# EAGLE library part TRIFILAR_TRANSFORMER (library HansToroid)
Transformer (having 3 windings) on a T50 Toroid
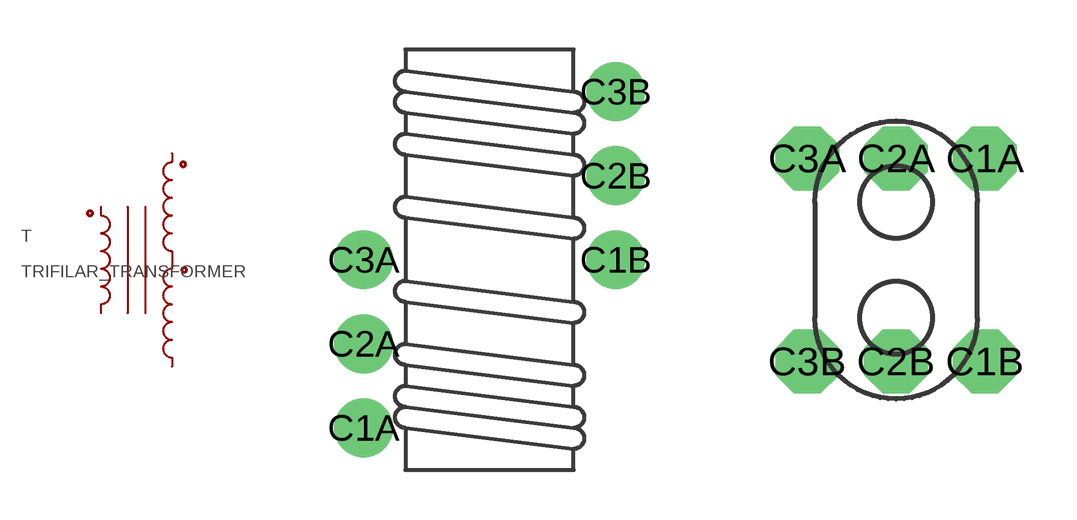
[diagram p3: symbol with the pads of T50_TRIFILAR_TRANSFORMER; footprints T50_TRIFILAR_TRANSFORMER, BN*2402_TRANSFORMER]

Designator prefix T

## TRIFILAR_TRANSFORMERTOROID  [T50_TRIFILAR_TRANSFORMER]
C1A  C1A
C1B  C1B
C2A  C2A
C2B  C2B
C3A  C3A
C3B  C3B

## TRIFILAR_TRANSFORMERBIN*2402  [BN*2402_TRANSFORMER]
Pads as for T50_TRIFILAR_TRANSFORMER

## TRIFILAR_TRANSFORMERT64_FLAT  [T64_TRIFILAR_TRANS_FLAT]
Pads as for T50_TRIFILAR_TRANSFORMER

## Footprint T50_TRIFILAR_TRANSFORMER (pad centres in mm)
Transformer (having 3 windings) on a T50 Toroid
drill 0.6 pad 1.778: C1A -3.81,-5.08; C1B 3.81,0; C2A -3.81,-2.54; C2B 3.81,2.54; C3A -3.81,0; C3B 3.81,5.08

## Footprint BN*2402_TRANSFORMER (pad centres in mm)
Transformer wound on a BN61-2402 Toroid
drill 0.914 pad 1.6 octagon: C1A 2.223,2.54; C1B 2.223,-2.54; C2A 0,2.54; C2B 0,-2.54; C3A -2.223,2.54; C3B -2.223,-2.54

## Footprint T64_TRIFILAR_TRANS_FLAT (pad centres in mm)
Transformer (having 3 windings) on a T50 Toroid
drill 1.016 pad 2.286: C1A 5.08,-8.89; C1B 8.89,5.08; C2A 7.62,-7.62; C2B 7.62,7.62; C3A 8.89,-5.08; C3B 5.08,8.89